# Altium integrated library RT9013-33GB.IntLib: 2 symbols
Pins are listed as number, name and electrical type; pins without a type are passive.

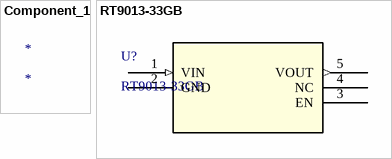
[diagram p0: symbols Component_1 to RT9013-33GB]

## Component_1
designator *

## RT9013-33GB
designator U?
No Description Available; Manufacturer_Name: Richtek Technology; Copyright: Copyright (C) 2025 Ultra Librarian. All rights reserved.; Manufacturer_Part_Number: RT9013-33GB; RefDes: RefDes; Type: Type
footprint SOT-23-5_RIT
pins: 1 VIN (in), 2 GND (power), 3 EN, 4 NC, 5 VOUT (out)